# Altium schematic symbol library C_1uF.SchLib: 1 symbol
Pins are listed as number, name and electrical type; pins without a type are passive.

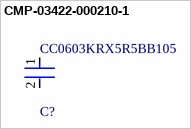
[diagram p0: symbol CMP-03422-000210-1]

## CMP-03422-000210-1
designator C?, comment CC0603KRX5R5BB105
CAP CER 1UF 6.3V X5R 0603; Manufacturer: YAGEO; Temperature Coefficient: 15%; Material: Ceramic; Tolerance: 0.1; Temperature: -55°C to +125°C; Manufacturer Part Number: CC0603KRX5R5BB105; Footprint Url: http://www.yageo.com/exep/pages/download/literatures/UPY-C_GEN_24.pdf; Value: 1 uF; Lead Free: Yes; Height: 0.9mm; Voltage Rating: 6.3 V; Package: CC0603-DA; Mouser Description: Multilayer Ceramic Capacitors MLCC - SMD/SMT 1uF 6.3V X5R 10%; ComponentLink2URL: http://www.yageo.com/documents/recent/UPY-GPHC_X7R_6.3V-to-50V_18.pdf; Category: Cap; Capacitance: 1 uF; Octopart: https://octopart.com/cc0603krx5r5bb105-yageo-9292796; Voltage: 6.3 V; Automotive: No; Digikey Description: CAP CER 1UF 6.3V X5R 0603; ComponentLink2Description: Datasheet; Device Class L2: Capacitors; Temperature Characteristic: X5R; RoHS: TRUE; Temperature Range High: +125°C; Temperature Range Low: -55°C; Device Class L3: Ceramic Capacitors; Device Class L1: Passive Components
footprint FP-CC0603-DA-IPC_B
footprint FP-CC0603-DA-IPC_A
footprint FP-CC0603-DA-IPC_C
footprint FP-CC0603-DA-MFG
pins: 1, 2